# Altium schematic symbol library 2019-09-10_11-11-09.SchLib: 2 symbols
Pins are listed as number, name and electrical type; pins without a type are passive.

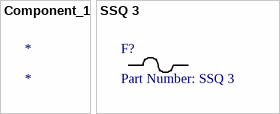
[diagram p0: symbols Component_1 to SSQ 3]

## Component_1
designator *

## SSQ 3
designator F?, comment Part Number: SSQ 3
No Description Available; Manufacturer_Part_Number: SSQ 3; Built_By: EMA_UL_Team; Vendor: BelFuse; Type: DEV; Copyright: Copyright (C) 2018 Accelerated Designs. All rights reserved; RefDes: RefDes; Value: Value
footprint SS
pins: 1, 2